# Altium integrated library Altium_MCU.IntLib: 35 symbols (part 2 of 2)
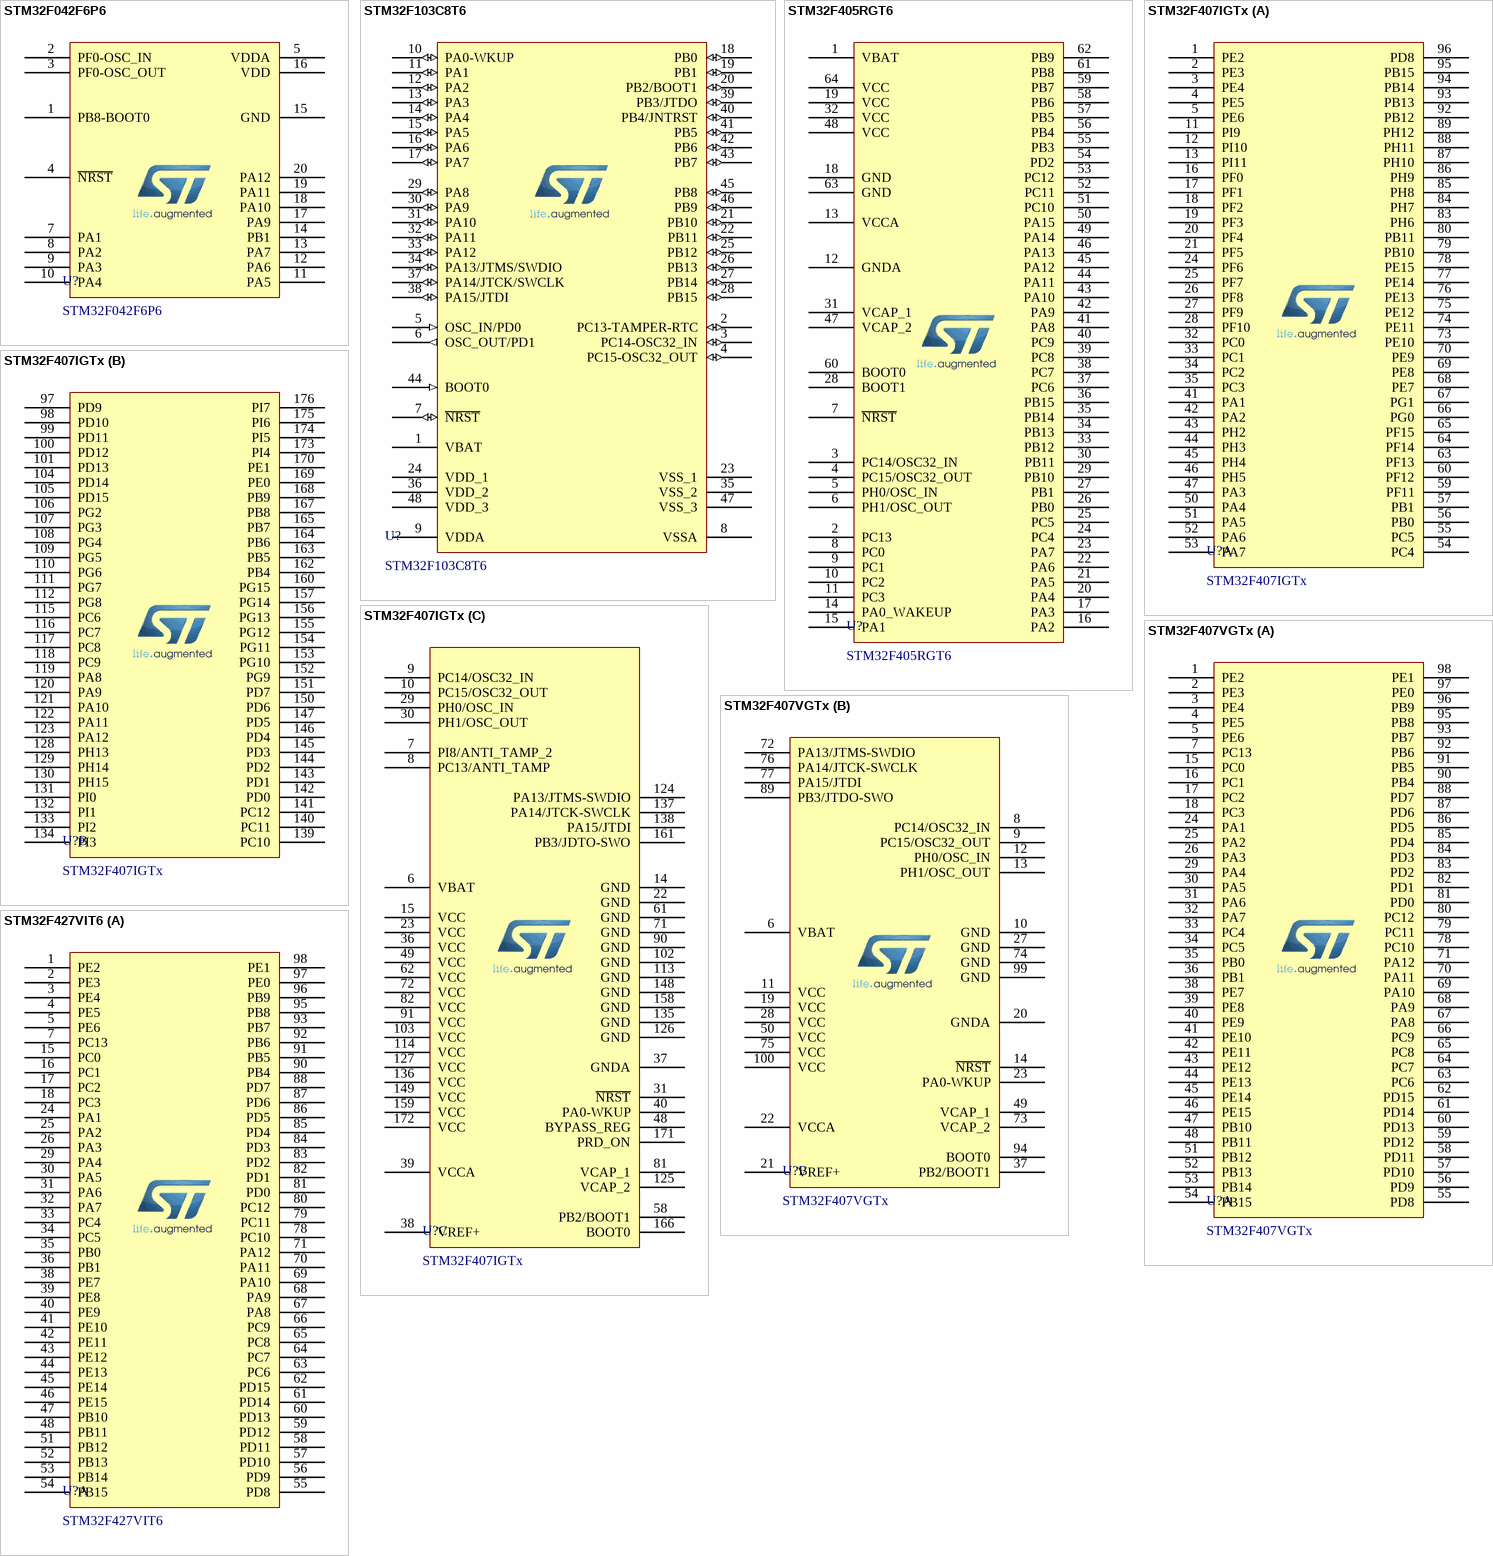
[diagram p6: symbols STM32F042F6P6 to STM32F427VIT6]

## STM32F407IGTx
designator U?
ARM Microcontrollers - MCU ARM M4 1024 FLASH 168 Mhz 192kB SRAM; Manufacturer: STMicroelectronics; Pad count: 176; Supply Voltage - Max: 3.6 V; Supply Voltage - Min: 2 V; Part Number: STM32F407IGTx; Value: STM32F407IGTx; Supplier 1 URL: https://www.mouser.com/ProductDetail/STMicroelectronics/STM32F407IGT6?qs=Z8%252BeY1k3TIKtCI1VFSVLrA%3D%3D; Supplier 2 URL: https://www.digikey.com/en/products/detail/stmicroelectronics/stm32f407igt6/2747118; Supplier 3 URL: N/A; Manufacturer Part Number: STM32F407IGTx; Packaging: Tape and Reel; Supplier 1: Mouser; Supplier 1 Part Number: 511-STM32F407IGT6; Supplier 2: Digi-Key; Supplier 2 Part Number: 497-11604-ND; Supplier 3: thegioiic; Supplier 3 Part Number: N/A; Mount: SMD/SMT; Operating Temperature Max: + 85 C; Operating Temperature Min: - 40 C; Package / Case: LQFP176; ComponentLink1Description: Datasheet; ComponentLink1URL: https://www.mouser.com/datasheet/2/389/stm32f405rg-1851084.pdf; LCSC Part #: N/A
footprint STM32F407IGTx (TSQFP, 176-Leads, Body 24.00x24.00mm, Pitch 0.50mm, IPC Medium Density)
part A pins: 1 PE2, 2 PE3, 3 PE4, 4 PE5, 5 PE6, 11 PI9, 12 PI10, 13 PI11, 16 PF0, 17 PF1, 18 PF2, 19 PF3, 20 PF4, 21 PF5, 24 PF6, 25 PF7, 26 PF8, 27 PF9, 28 PF10, 32 PC0, 33 PC1, 34 PC2, 35 PC3, 41 PA1, 42 PA2, 43 PH2, 44 PH3, 45 PH4, 46 PH5, 47 PA3, 50 PA4, 51 PA5, 52 PA6, 53 PA7, 54 PC4, 55 PC5, 56 PB0, 57 PB1, 59 PF11, 60 PF12, 63 PF13, 64 PF14, 65 PF15, 66 PG0, 67 PG1, 68 PE7, 69 PE8, 70 PE9, 73 PE10, 74 PE11, 75 PE12, 76 PE13, 77 PE14, 78 PE15, 79 PB10, 80 PB11, 83 PH6, 84 PH7, 85 PH8, 86 PH9, 87 PH10, 88 PH11, 89 PH12, 92 PB12, 93 PB13, 94 PB14, 95 PB15, 96 PD8
part B pins: 97 PD9, 98 PD10, 99 PD11, 100 PD12, 101 PD13, 104 PD14, 105 PD15, 106 PG2, 107 PG3, 108 PG4, 109 PG5, 110 PG6, 111 PG7, 112 PG8, 115 PC6, 116 PC7, 117 PC8, 118 PC9, 119 PA8, 120 PA9, 121 PA10, 122 PA11, 123 PA12, 128 PH13, 129 PH14, 130 PH15, 131 PI0, 132 PI1, 133 PI2, 134 PI3, 139 PC10, 140 PC11, 141 PC12, 142 PD0, 143 PD1, 144 PD2, 145 PD3, 146 PD4, 147 PD5, 150 PD6, 151 PD7, 152 PG9, 153 PG10, 154 PG11, 155 PG12, 156 PG13, 157 PG14, 160 PG15, 162 PB4, 163 PB5, 164 PB6, 165 PB7, 167 PB8, 168 PB9, 169 PE0, 170 PE1, 173 PI4, 174 PI5, 175 PI6, 176 PI7
part C pins: 6 VBAT, 7 PI8/ANTI_TAMP_2, 8 PC13/ANTI_TAMP, 9 PC14/OSC32_IN, 10 PC15/OSC32_OUT, 14 GND, 15 VCC, 22 GND, 23 VCC, 29 PH0/OSC_IN, 30 PH1/OSC_OUT, 31 ~{NRST}, 36 VCC, 37 GNDA, 38 VREF+, 39 VCCA, 40 PA0-WKUP, 48 BYPASS_REG, 49 VCC, 58 PB2/BOOT1, 61 GND, 62 VCC, 71 GND, 72 VCC, 81 VCAP_1, 82 VCC, 90 GND, 91 VCC, 102 GND, 103 VCC, 113 GND, 114 VCC, 124 PA13/JTMS-SWDIO, 125 VCAP_2, 126 GND, 127 VCC, 135 GND, 136 VCC, 137 PA14/JTCK-SWCLK, 138 PA15/JTDI, 148 GND, 149 VCC, 158 GND, 159 VCC, 161 PB3/JDTO-SWO, 166 BOOT0, 171 PRD_ON, 172 VCC

## STM32F407VGTx
designator U?
ARM Microcontrollers - MCU ARM M4 1024 FLASH 168 Mhz 192kB SRAM; Manufacturer: STMicroelectronics; Part Number: STM32F407IGTx; Pad count: 100; Supply Voltage - Max: 3.6 V; Supply Voltage - Min: 2 V; Value: STM32F407VGTx; Supplier 1 URL: https://www.mouser.com/ProductDetail/STMicroelectronics/STM32F407VGT6?qs=Z8%252BeY1k3TIKAEQqwbO%2FOzA%3D%3D; Supplier 2 URL: https://www.digikey.com/en/products/detail/stmicroelectronics/stm32f407vgt6/2747117; Supplier 3 URL: N/A; Manufacturer Part Number: STM32F407VGTx; Packaging: Tape and Reel; Supplier 1: Mouser; Supplier 1 Part Number: 511-STM32F407VGT6; Supplier 2: Digi-Key; Supplier 2 Part Number: 497-11605-ND; Supplier 3: thegioiic; Supplier 3 Part Number: N/A; Mount: SMD/SMT; Operating Temperature Max: + 85 C; Operating Temperature Min: - 40 C; Package / Case: LQFP100; ComponentLink1Description: Datasheet; ComponentLink1URL: https://www.mouser.com/datasheet/2/389/stm32f745ie-1851206.pdf; LCSC Part #: N/A
footprint STM32F407VGTx (TSQFP, 100-Leads, Body 14.00x14.00mm, Pitch 0.50mm, IPC Medium Density)
part A pins: 1 PE2, 2 PE3, 3 PE4, 4 PE5, 5 PE6, 7 PC13, 15 PC0, 16 PC1, 17 PC2, 18 PC3, 24 PA1, 25 PA2, 26 PA3, 29 PA4, 30 PA5, 31 PA6, 32 PA7, 33 PC4, 34 PC5, 35 PB0, 36 PB1, 38 PE7, 39 PE8, 40 PE9, 41 PE10, 42 PE11, 43 PE12, 44 PE13, 45 PE14, 46 PE15, 47 PB10, 48 PB11, 51 PB12, 52 PB13, 53 PB14, 54 PB15, 55 PD8, 56 PD9, 57 PD10, 58 PD11, 59 PD12, 60 PD13, 61 PD14, 62 PD15, 63 PC6, 64 PC7, 65 PC8, 66 PC9, 67 PA8, 68 PA9, 69 PA10, 70 PA11, 71 PA12, 78 PC10, 79 PC11, 80 PC12, 81 PD0, 82 PD1, 83 PD2, 84 PD3, 85 PD4, 86 PD5, 87 PD6, 88 PD7, 90 PB4, 91 PB5, 92 PB6, 93 PB7, 95 PB8, 96 PB9, 97 PE0, 98 PE1
part B pins: 6 VBAT, 8 PC14/OSC32_IN, 9 PC15/OSC32_OUT, 10 GND, 11 VCC, 12 PH0/OSC_IN, 13 PH1/OSC_OUT, 14 ~{NRST}, 19 VCC, 20 GNDA, 21 VREF+, 22 VCCA, 23 PA0-WKUP, 27 GND, 28 VCC, 37 PB2/BOOT1, 49 VCAP_1, 50 VCC, 72 PA13/JTMS-SWDIO, 73 VCAP_2, 74 GND, 75 VCC, 76 PA14/JTCK-SWCLK, 77 PA15/JTDI, 89 PB3/JTDO-SWO, 94 BOOT0, 99 GND, 100 VCC

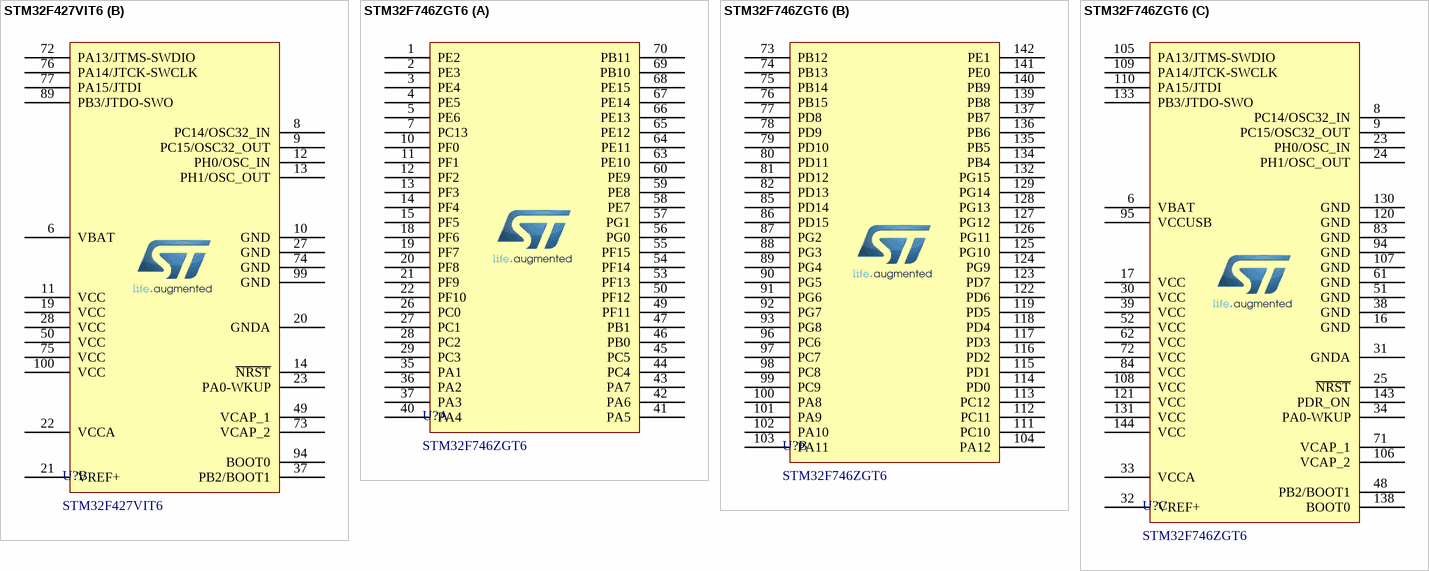
[diagram p5: symbols STM32F427VIT6 to STM32F746ZGT6]

## STM32F427VIT6
designator U?
ARM Microcontrollers - MCU 32B ARM Cortex-M4 2Mb Flash 168MHz CPU; Manufacturer: STMicroelectronics; Part Number: STM32F427VIT6A; Pad count: 100; Supply Voltage - Max: 3.6 V; Supply Voltage - Min: 2 V; Value: STM32F427VIT6; Supplier 1 URL: https://www.mouser.com/ProductDetail/STMicroelectronics/STM32F427VIT6?qs=GlLcxsc1hfFxlQzXIfPRUw%3D%3D; Supplier 2 URL: https://www.digikey.com/en/products/detail/stmicroelectronics/stm32f429vit6g/8257805; Supplier 3 URL: N/A; Manufacturer Part Number: STM32F427VIT6; Packaging: Tape and Reel; Supplier 1: Mouser; Supplier 1 Part Number: 511-STM32F427VIT6; Supplier 2: Digi-Key; Supplier 2 Part Number: STM32F429VIT6G-ND; Supplier 3: thegioiic; Supplier 3 Part Number: N/A; Mount: SMD/SMT; Operating Temperature Max: + 85 C; Operating Temperature Min: - 40 C; Package / Case: LQFP100; ComponentLink1Description: Datasheet; ComponentLink1URL: https://www.mouser.com/datasheet/2/389/stm32f427vg-1760963.pdf; LCSC Part #: N/A
footprint STM32F427VIT6 (TSQFP, 100-Leads, Body 14.00x14.00mm, Pitch 0.50mm, IPC Medium Density)
part A pins: 1 PE2, 2 PE3, 3 PE4, 4 PE5, 5 PE6, 7 PC13, 15 PC0, 16 PC1, 17 PC2, 18 PC3, 24 PA1, 25 PA2, 26 PA3, 29 PA4, 30 PA5, 31 PA6, 32 PA7, 33 PC4, 34 PC5, 35 PB0, 36 PB1, 38 PE7, 39 PE8, 40 PE9, 41 PE10, 42 PE11, 43 PE12, 44 PE13, 45 PE14, 46 PE15, 47 PB10, 48 PB11, 51 PB12, 52 PB13, 53 PB14, 54 PB15, 55 PD8, 56 PD9, 57 PD10, 58 PD11, 59 PD12, 60 PD13, 61 PD14, 62 PD15, 63 PC6, 64 PC7, 65 PC8, 66 PC9, 67 PA8, 68 PA9, 69 PA10, 70 PA11, 71 PA12, 78 PC10, 79 PC11, 80 PC12, 81 PD0, 82 PD1, 83 PD2, 84 PD3, 85 PD4, 86 PD5, 87 PD6, 88 PD7, 90 PB4, 91 PB5, 92 PB6, 93 PB7, 95 PB8, 96 PB9, 97 PE0, 98 PE1
part B pins: 6 VBAT, 8 PC14/OSC32_IN, 9 PC15/OSC32_OUT, 10 GND, 11 VCC, 12 PH0/OSC_IN, 13 PH1/OSC_OUT, 14 ~{NRST}, 19 VCC, 20 GNDA, 21 VREF+, 22 VCCA, 23 PA0-WKUP, 27 GND, 28 VCC, 37 PB2/BOOT1, 49 VCAP_1, 50 VCC, 72 PA13/JTMS-SWDIO, 73 VCAP_2, 74 GND, 75 VCC, 76 PA14/JTCK-SWCLK, 77 PA15/JTDI, 89 PB3/JTDO-SWO, 94 BOOT0, 99 GND, 100 VCC

## STM32F746ZGT6
designator U?
ARM Microcontrollers - MCU High-performance & DSP FPU Arm Cortex-M7 MCU 1 Mbyte of Flash 216 MHz CPU, Art A; Manufacturer: STMicroelectronics; Part Number: STM32F746ZGT6A; Pad count: 144; Supply Voltage - Max: 3.6 V; Supply Voltage - Min: 2 V; Value: STM32F746ZGT6; Supplier 1 URL: https://www.mouser.com/ProductDetail/STMicroelectronics/STM32F746ZGT6?qs=E2FFEhwHWtea9cFNtjZMIQ%3D%3D; Supplier 2 URL: https://www.digikey.com/en/products/detail/stmicroelectronics/stm32f746zgt6g/8257836; Supplier 3 URL: N/A; Manufacturer Part Number: STM32F746ZGT6A; Packaging: Tape and Reel; Supplier 1: Mouser; Supplier 1 Part Number: 511-STM32F746ZGT6; Supplier 2: Digi-Key; Supplier 2 Part Number: STM32F746ZGT6G-ND; Supplier 3: thegioiic; Supplier 3 Part Number: N/A; Mount: SMD/SMT; Operating Temperature Max: + 85 C; Operating Temperature Min: - 40 C; Package / Case: LQFP144; ComponentLink1Description: Datasheet; ComponentLink1URL: https://www.mouser.com/datasheet/2/389/stm32f745ie-1851206.pdf; LCSC Part #: N/A
footprint STM32F746ZGT6 (TSQFP, 144-Leads, Body 20.00x20.00mm, Pitch 0.50mm, IPC Medium Density)
part A pins: 1 PE2, 2 PE3, 3 PE4, 4 PE5, 5 PE6, 7 PC13, 10 PF0, 11 PF1, 12 PF2, 13 PF3, 14 PF4, 15 PF5, 18 PF6, 19 PF7, 20 PF8, 21 PF9, 22 PF10, 26 PC0, 27 PC1, 28 PC2, 29 PC3, 35 PA1, 36 PA2, 37 PA3, 40 PA4, 41 PA5, 42 PA6, 43 PA7, 44 PC4, 45 PC5, 46 PB0, 47 PB1, 49 PF11, 50 PF12, 53 PF13, 54 PF14, 55 PF15, 56 PG0, 57 PG1, 58 PE7, 59 PE8, 60 PE9, 63 PE10, 64 PE11, 65 PE12, 66 PE13, 67 PE14, 68 PE15, 69 PB10, 70 PB11
part B pins: 73 PB12, 74 PB13, 75 PB14, 76 PB15, 77 PD8, 78 PD9, 79 PD10, 80 PD11, 81 PD12, 82 PD13, 85 PD14, 86 PD15, 87 PG2, 88 PG3, 89 PG4, 90 PG5, 91 PG6, 92 PG7, 93 PG8, 96 PC6, 97 PC7, 98 PC8, 99 PC9, 100 PA8, 101 PA9, 102 PA10, 103 PA11, 104 PA12, 111 PC10, 112 PC11, 113 PC12, 114 PD0, 115 PD1, 116 PD2, 117 PD3, 118 PD4, 119 PD5, 122 PD6, 123 PD7, 124 PG9, 125 PG10, 126 PG11, 127 PG12, 128 PG13, 129 PG14, 132 PG15, 134 PB4, 135 PB5, 136 PB6, 137 PB7, 139 PB8, 140 PB9, 141 PE0, 142 PE1
part C pins: 6 VBAT, 8 PC14/OSC32_IN, 9 PC15/OSC32_OUT, 16 GND, 17 VCC, 23 PH0/OSC_IN, 24 PH1/OSC_OUT, 25 ~{NRST}, 30 VCC, 31 GNDA, 32 VREF+, 33 VCCA, 34 PA0-WKUP, 38 GND, 39 VCC, 48 PB2/BOOT1, 51 GND, 52 VCC, 61 GND, 62 VCC, 71 VCAP_1, 72 VCC, 83 GND, 84 VCC, 94 GND, 95 VCCUSB, 105 PA13/JTMS-SWDIO, 106 VCAP_2, 107 GND, 108 VCC, 109 PA14/JTCK-SWCLK, 110 PA15/JTDI, 120 GND, 121 VCC, 130 GND, 131 VCC, 133 PB3/JTDO-SWO, 138 BOOT0, 143 PDR_ON, 144 VCC